# Altium footprint library CoilcraftPCB.PcbLib: 320 footprints (part 18 of 20)
Each footprint in its own frame and in the unit in brackets; x right, y up, seen from the top. Pads: shape width x height; smd on the part's side, far side on the other; paste and mask are expansions set on the pad; w line width, h text height; cw(c..) or ccw(c..) is an arc to the next point about the centre after c.
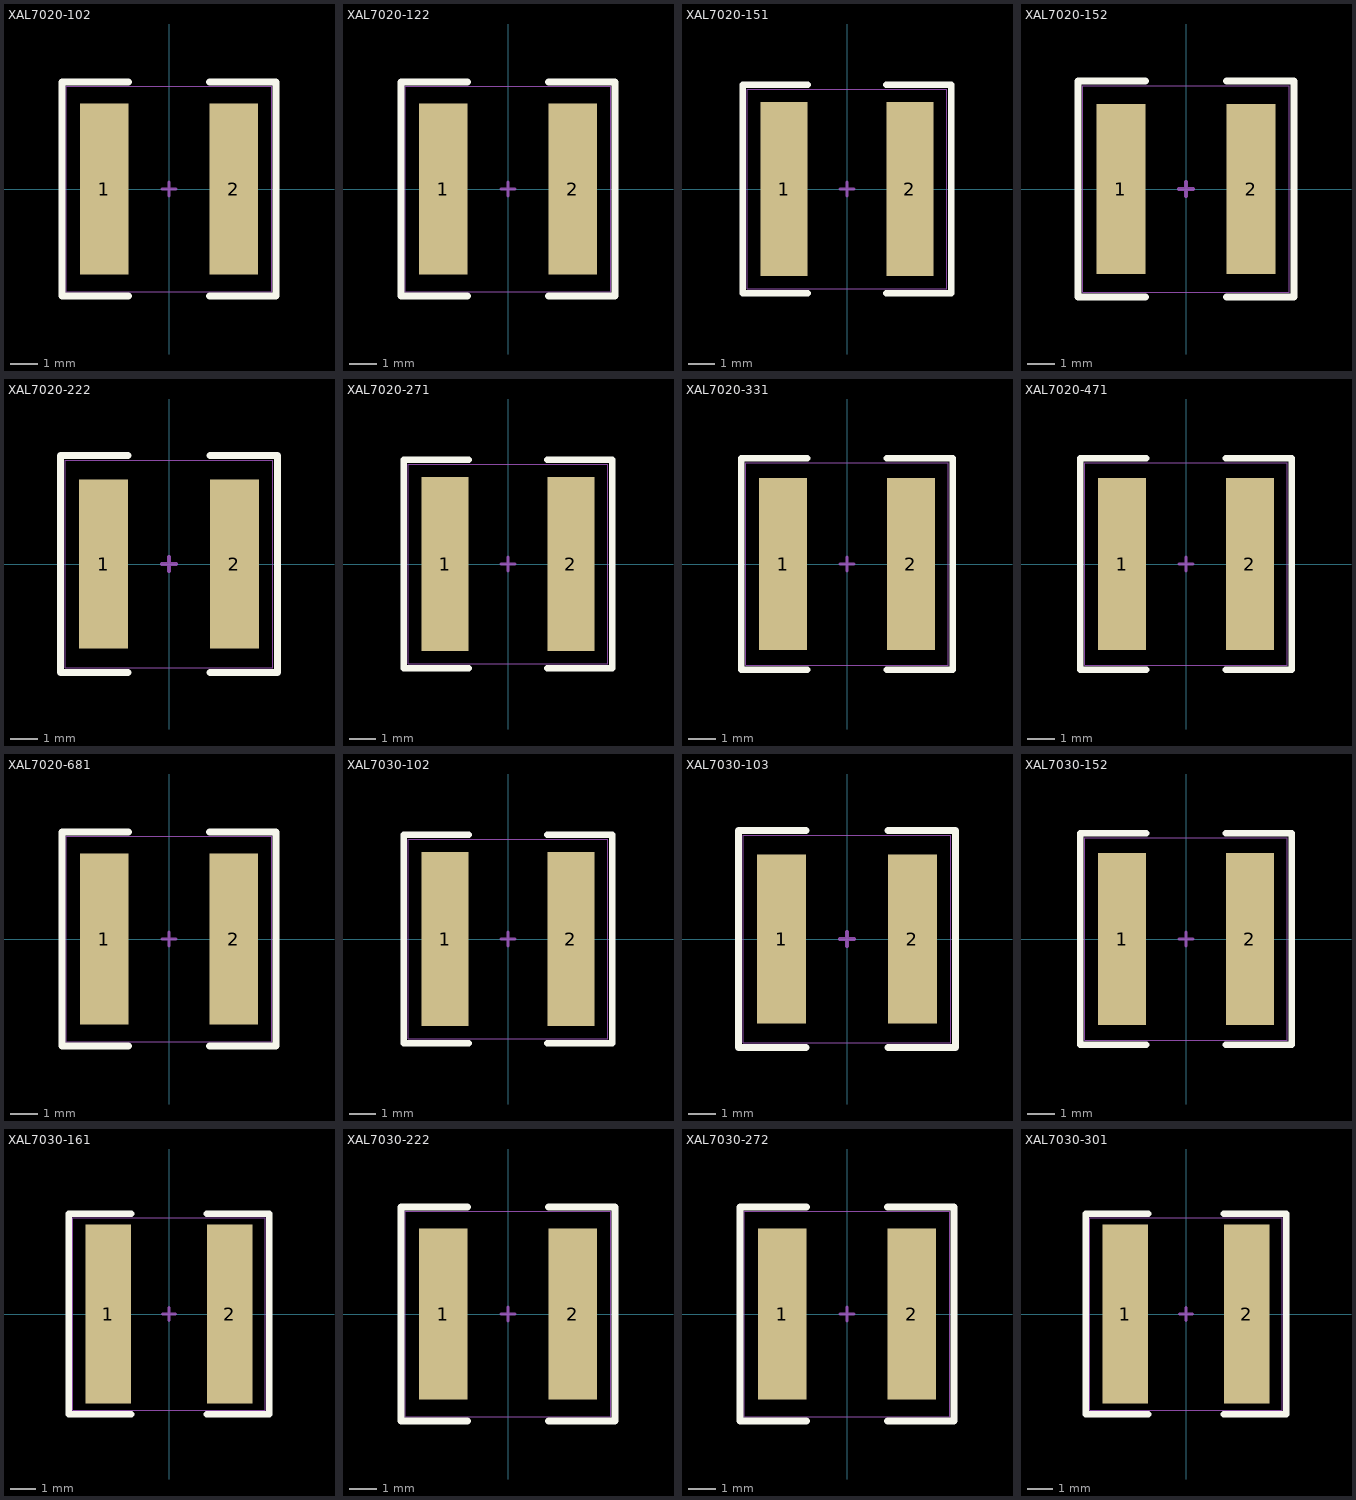
[diagram p17: the footprints below, top view; thin cyan lines are the x and y axes]

## XAL7020-102 [mil] "Coilcraft High Temperature Shielded Power Inductors"
height 79
pads (2):
  rect 70x245 smd: 1(-93,0) 2(93,0)
Top Overlay:
  lines w10: -58,-154 -154,-154 -154,154 -58,154 ; 58,-154 154,-154 154,154 58,154
Mechanical 13:
  lines w5: -10,0 10,0 ; 0,-10 0,10
Mechanical 14:
  lines w1: -147.5,-147.5 -147.5,147.5 147.5,147.5 147.5,-147.5 -147.5,-147.5
3D body: height 78.8, standoff 0.06, extent -157.48,-157.48 157.48,157.48

## XAL7020-122 [mil] "Coilcraft High Temperature Shielded Power Inductors"
height 79
pads (2):
  rect 70x245 smd: 1(-93,0) 2(93,0)
Top Overlay:
  lines w10: -58,-154 -154,-154 -154,154 -58,154 ; 58,-154 154,-154 154,154 58,154
Mechanical 13:
  lines w5: -10,0 10,0 ; 0,-10 0,10
Mechanical 14:
  lines w1: -147.5,-147.5 147.5,-147.5 147.5,147.5 -147.5,147.5 -147.5,-147.5
3D body: height 78.8, standoff 0.06, extent -157.48,-157.48 157.48,157.48

## XAL7020-151 [mil] "Coilcraft High Temperature Shielded Power Inductors"
height 79
pads (2):
  rect 70x257 smd: 1(-93,0) 2(93,0)
Top Overlay:
  lines w10: -58,-154 -154,-154 -154,154 -58,154 ; 58,-154 154,-154 154,154 58,154
Mechanical 13:
  lines w5: -10,0 10,0 ; 0,-10 0,10
Mechanical 14:
  lines w1: -147.5,-147.5 -147.5,147.5 147.5,147.5 147.5,-147.5 -147.5,-147.5
3D body: height 78.8, standoff -1.91, extent -157.48,-157.48 157.48,157.48

## XAL7020-152 [mil] "Coilcraft High Temperature Shielded Power Inductors"
height 79
pads (2):
  rect 70x242 smd: 1(-93,0) 2(93,0)
Top Overlay:
  lines w10: -58,-154 -154,-154 -154,154 -58,154 ; 58,-154 154,-154 154,154 58,154
Mechanical 13:
  lines w5: -10,0 10,0 ; 0,-10 0,10
Mechanical 14:
  lines w1: -147.5,-147.5 147.5,-147.5 147.5,147.5 -147.5,147.5 -147.5,-147.5
3D body: height 78.8, standoff 0.06, extent -157.48,-157.48 157.48,157.48

## XAL7020-222 [mil] "Coilcraft High Temperature Shielded Power Inductors"
height 79
pads (2):
  rect 70x240 smd: 1(-93,0) 2(93,0)
Top Overlay:
  lines w10: -58,-154 -154,-154 -154,154 -58,154 ; 58,-154 154,-154 154,154 58,154
Mechanical 13:
  lines w5: -10,0 10,0 ; 0,-10 0,10
Mechanical 14:
  lines w1: -147.5,-147.5 -147.5,147.5 147.5,147.5 147.5,-147.5 -147.5,-147.5
3D body: height 78.8, standoff 0.06, extent -157.48,-157.48 157.48,157.48

## XAL7020-271 [mil] "Coilcraft High Temperature Shielded Power Inductors"
height 79
pads (2):
  rect 70x257 smd: 1(-93,0) 2(93,0)
Top Overlay:
  lines w10: -58,-154 -154,-154 -154,154 -58,154 ; 58,-154 154,-154 154,154 58,154
Mechanical 13:
  lines w5: -10,0 10,0 ; 0,-10 0,10
Mechanical 14:
  lines w1: -147.5,-147.5 -147.5,147.5 147.5,147.5 147.5,-147.5 -147.5,-147.5
3D body: height 78.8, standoff -1.91, extent -157.48,-157.48 157.48,157.48

## XAL7020-331 [mil] "Coilcraft High Temperature Shielded Power Inductors"
height 79
pads (2):
  rect 70x251 smd: 1(-93,0) 2(93,0)
Top Overlay:
  lines w10: -58,-154 -154,-154 -154,154 -58,154 ; 58,-154 154,-154 154,154 58,154
Mechanical 13:
  lines w5: -10,0 10,0 ; 0,-10 0,10
Mechanical 14:
  lines w1: -147.5,-147.5 -147.5,147.5 147.5,147.5 147.5,-147.5 -147.5,-147.5
3D body: height 78.8, standoff 0.06, extent -157.48,-157.48 157.48,157.48

## XAL7020-471 [mil] "Coilcraft High Temperature Shielded Power Inductors"
height 79
pads (2):
  rect 70x251 smd: 1(-93,0) 2(93,0)
Top Overlay:
  lines w10: -58,-154 -154,-154 -154,154 -58,154 ; 58,-154 154,-154 154,154 58,154
Mechanical 13:
  lines w5: -10,0 10,0 ; 0,-10 0,10
Mechanical 14:
  lines w1: -147.5,-147.5 147.5,-147.5 147.5,147.5 -147.5,147.5 -147.5,-147.5
3D body: height 78.8, standoff 0.06, extent -157.48,-157.48 157.48,157.48

## XAL7020-681 [mil] "Coilcraft High Temperature Shielded Power Inductors"
height 79
pads (2):
  rect 70x245 smd: 1(-93,0) 2(93,0)
Top Overlay:
  lines w10: -58,-154 -154,-154 -154,154 -58,154 ; 58,-154 154,-154 154,154 58,154
Mechanical 13:
  lines w5: -10,0 10,0 ; 0,-10 0,10
Mechanical 14:
  lines w1: -147.5,-147.5 147.5,-147.5 147.5,147.5 -147.5,147.5 -147.5,-147.5
3D body: height 78.8, standoff 0.06, extent -157.48,-157.48 157.48,157.48

## XAL7030-102 [mil] "Coilcraft High Temperature Shielded Power Inductors"
height 122
pads (2):
  rect 70x257 smd: 1(-93,0) 2(93,0)
Top Overlay:
  lines w10: -58,-154 -154,-154 -154,154 -58,154 ; 58,-154 154,-154 154,154 58,154
Mechanical 13:
  lines w5: -10,0 10,0 ; 0,-10 0,10
Mechanical 14:
  lines w1: -147.5,-147.5 147.5,-147.5 147.5,147.5 -147.5,147.5 -147.5,-147.5
3D body: height 122.11, standoff 0.06, extent -157.48,-157.48 157.48,157.48

## XAL7030-103 [mil] "Coilcraft High Temperature Shielded Power Inductors"
height 122
pads (2):
  rect 70x240 smd: 1(-93,0) 2(93,0)
Top Overlay:
  lines w10: -58,-154 -154,-154 -154,154 -58,154 ; 58,-154 154,-154 154,154 58,154
Mechanical 13:
  lines w5: -10,0 10,0 ; 0,-10 0,10
Mechanical 14:
  lines w1: -147.5,-147.5 -147.5,147.5 147.5,147.5 147.5,-147.5 -147.5,-147.5
3D body: height 122, standoff 0, extent -147.5,-147.5 147.5,147.5

## XAL7030-152 [mil] "Coilcraft High Temperature Shielded Power Inductors"
height 122
pads (2):
  rect 70x251 smd: 1(-93,0) 2(93,0)
Top Overlay:
  lines w10: -58,-154 -154,-154 -154,154 -58,154 ; 58,-154 154,-154 154,154 58,154
Mechanical 13:
  lines w5: -10,0 10,0 ; 0,-10 0,10
Mechanical 14:
  lines w1: -147.5,-147.5 -147.5,147.5 147.5,147.5 147.5,-147.5 -147.5,-147.5
3D body: height 122.11, standoff 0.06, extent -157.48,-157.48 157.48,157.48

## XAL7030-161 [mil] "Coilcraft High Temperature Shielded Power Inductors"
height 122
pads (2):
  rect 70x274 smd: 1(-93,0) 2(93,0)
Top Overlay:
  lines w10: -58,-154 -154,-154 -154,154 -58,154 ; 58,-154 154,-154 154,154 58,154
Mechanical 13:
  lines w5: -10,0 10,0 ; 0,-10 0,10
Mechanical 14:
  lines w1: -147.5,-147.5 147.5,-147.5 147.5,147.5 -147.5,147.5 -147.5,-147.5
3D body: height 122.11, standoff 0.06, extent -157.48,-157.48 157.48,157.48

## XAL7030-222 [mil] "Coilcraft High Temperature Shielded Power Inductors"
height 122
pads (2):
  rect 70x245 smd: 1(-93,0) 2(93,0)
Top Overlay:
  lines w10: -58,-154 -154,-154 -154,154 -58,154 ; 58,-154 154,-154 154,154 58,154
Mechanical 13:
  lines w5: -10,0 10,0 ; 0,-10 0,10
Mechanical 14:
  lines w1: -147.5,-147.5 147.5,-147.5 147.5,147.5 -147.5,147.5 -147.5,-147.5
3D body: height 122.11, standoff 0.06, extent -157.48,-157.48 157.48,157.48

## XAL7030-272 [mil] "Coilcraft High Temperature Shielded Power Inductors"
height 122
pads (2):
  rect 70x245 smd: 1(-93,0) 2(93,0)
Top Overlay:
  lines w10: -58,-154 -154,-154 -154,154 -58,154 ; 58,-154 154,-154 154,154 58,154
Mechanical 13:
  lines w5: -10,0 10,0 ; 0,-10 0,10
Mechanical 14:
  lines w1: -147.5,-147.5 147.5,-147.5 147.5,147.5 -147.5,147.5 -147.5,-147.5
3D body: height 122.11, standoff 0.06, extent -157.48,-157.48 157.48,157.48

## XAL7030-301 [mil] "Coilcraft High Temperature Shielded Power Inductors"
height 122
pads (2):
  rect 70x274 smd: 1(-93,0) 2(93,0)
Top Overlay:
  lines w10: -58,-154 -154,-154 -154,154 -58,154 ; 58,-154 154,-154 154,154 58,154
Mechanical 13:
  lines w5: -10,0 10,0 ; 0,-10 0,10
Mechanical 14:
  lines w1: -147.5,-147.5 147.5,-147.5 147.5,147.5 -147.5,147.5 -147.5,-147.5
3D body: height 122.11, standoff 0.06, extent -157.48,-157.48 157.48,157.48